# Altium schematic symbol library Ic%.SchLib: 452 symbols (part 2 of 12)
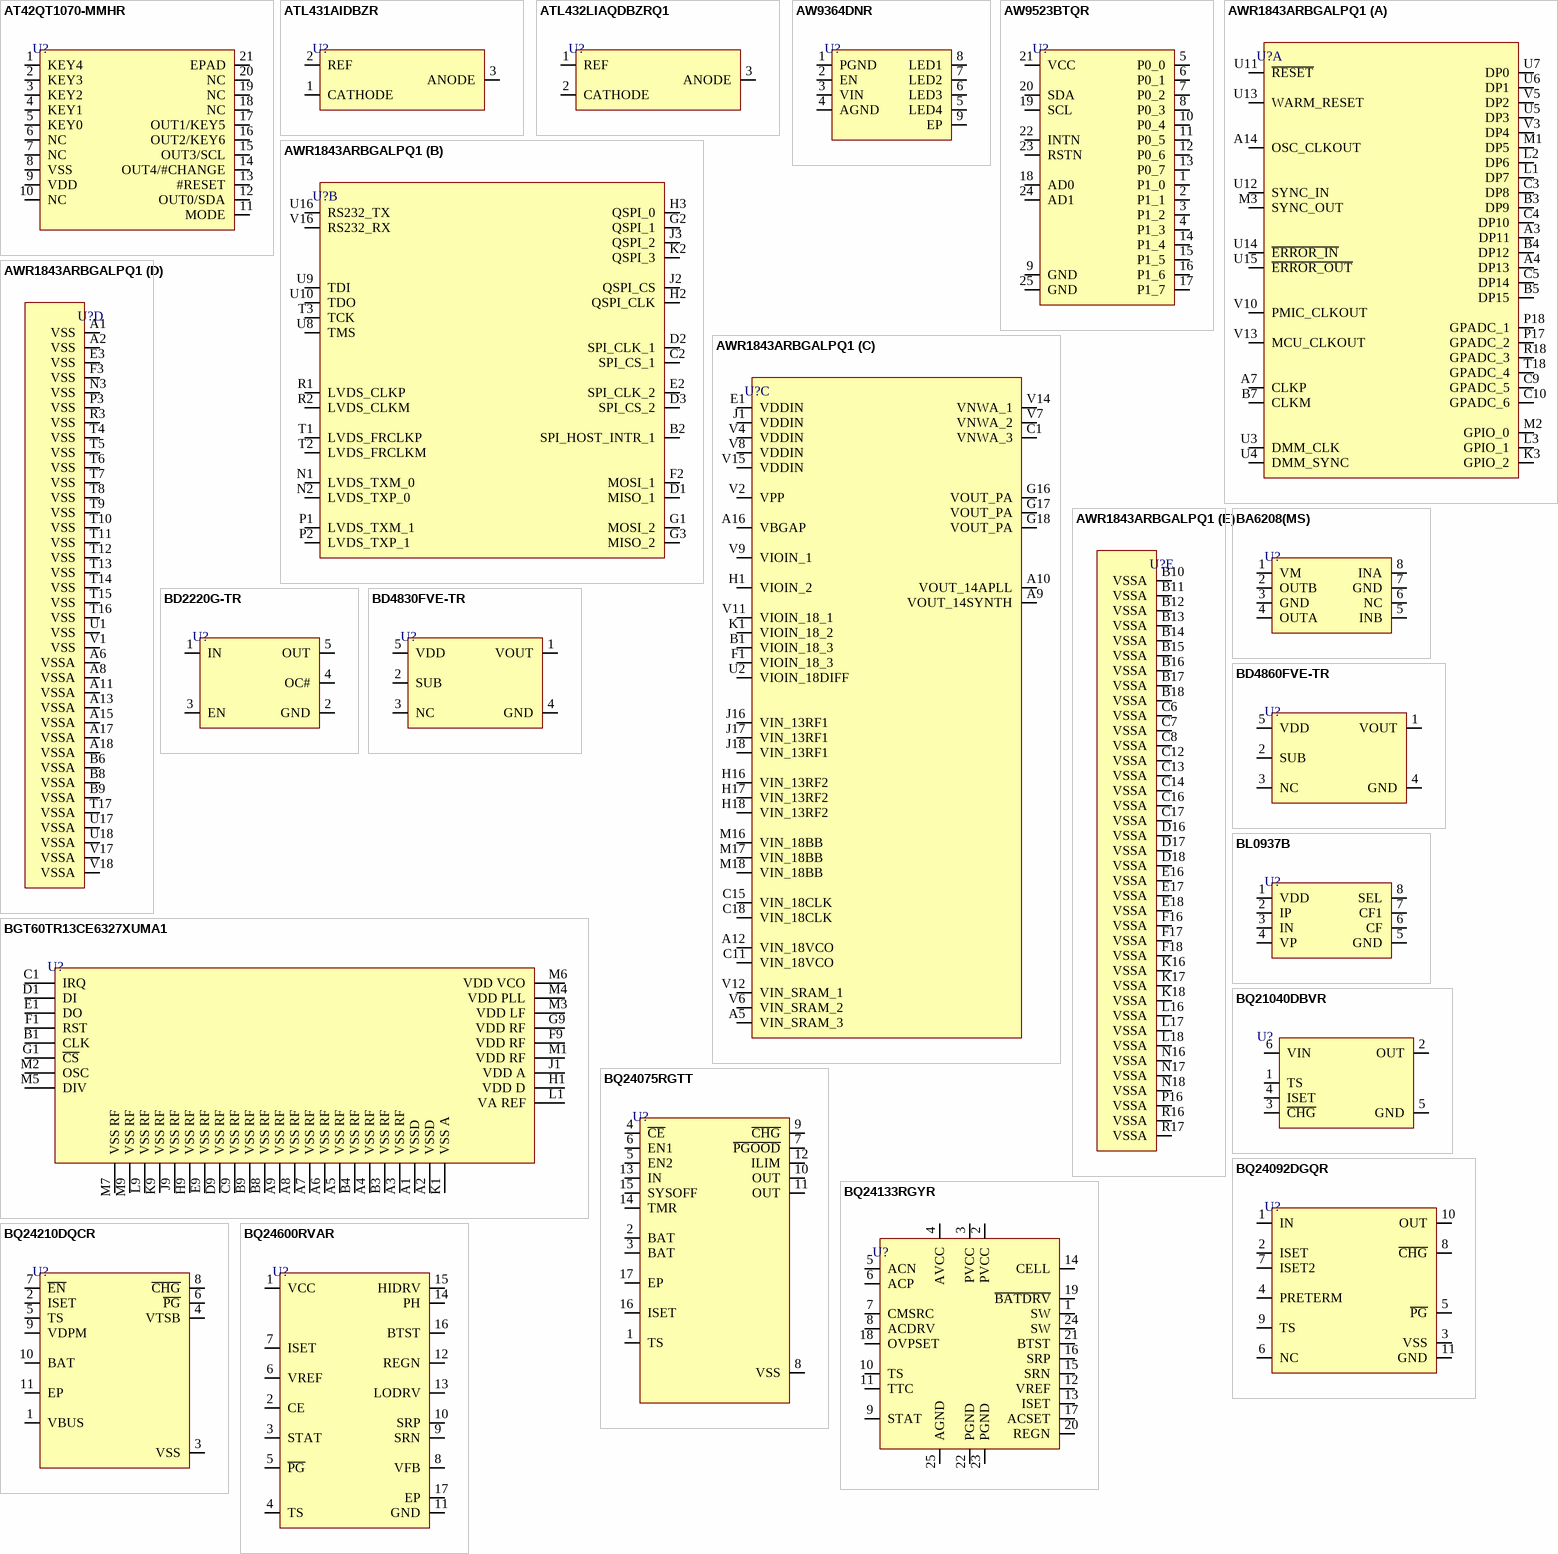
[diagram p24: symbols AT42QT1070-MMHR to BQ24600RVAR]

## BD2220G-TR
designator U?
IC PWR SWITCH N-CHAN 1:1 5SSOP; Manufacturer: Rohm; Manufacturer Part Number: BD2220G-TR; Supplier: Mouser; LCSC Part Number: C5362383; RoHS: Yes; Item Type: IC; Stock: 1594; Pricing: 1=0.86, 10=0.617, 50=0.556, 100=0.489, 1000=0.407, 10000=0.371 (USD); ComponentLink1URL: http://www.mouser.com/ds/2/348/bd2220g-e-372128.pdf?src-supplier=Mouser; ComponentLink1Description: http://www.mouser.com/ds/2/348/bd2220g-e-372128.pdf?src-supplier=Mouser; ComponentLink2URL: http://rohmfs.rohm.com/en/products/databook/datasheet/ic/power/power_switch/bd2220g-e.pdf?src-supplier=Digikey; ComponentLink2Description: http://rohmfs.rohm.com/en/products/databook/datasheet/ic/power/power_switch/bd2220g-e.pdf?src-supplier=Digikey; ComponentLink3URL: http://rohmfs.rohm.com/en/products/databook/datasheet/ic/power/power_switch/bd2220g-e.pdf?src-supplier=Avnet; ComponentLink3Description: http://rohmfs.rohm.com/en/products/databook/datasheet/ic/power/power_switch/bd2220g-e.pdf?src-supplier=Avnet
footprint SSOP-5
pins: 1 IN, 2 GND, 3 EN, 4 OC#, 5 OUT

## BD4830FVE-TR
designator U?
Active Low 1 VSOF-5 Monitors & Reset Circuits ROHS; Manufacturer: Rohm; Manufacturer Part Number: BD4830FVE-TR; Max Supply Voltage: 10V; Max Power Dissipation: 210mW; Min Supply Voltage: 1.2V; Number of Voltages Monitored: 1; Threshold Voltage: 6V; Accuracy: 1%; Operating Supply Current: 900nA; Max Supply Current: 1.98uA; Watchdog Timer: No; Min Reset Threshold Voltage: 5.91V; Max Reset Threshold Voltage: 6.09V; Item Type: IC; RoHS: Yes; Category: Voltage Supervisors; Stock 1: 5990; Pricing 1: 1=0.64000, 10=0.54900, 25=0.51200, 100=0.40960, 250=0.38032, 500=0.32182, 1000=0.24868 (USD); Mounting Technology: Surface Mount; Case/Package: VSOF; Pins: 5; Min Operating Temperature: -40°C; Max Operating Temperature: 105°C; Package Quantity: 3000; Packaging: Tape and Reel; Reset: Active Low; Number of Monitored Inputs: 1; Type: Simple Reset/Power-On Reset,Voltage Detector; Series: BD48xxx; Lead Free: Lead Free; RoHS Compliant: Yes; ComponentLink1URL: https://datasheet.ciiva.com/1974/bd48xxg-e-1974994.pdf?src-supplier=Digi-Key; ComponentLink1Description: https://datasheet.ciiva.com/1974/bd48xxg-e-1974994.pdf?src-supplier=Digi-Key; ComponentLink2URL: https://datasheet.ciiva.com/8133/bd48xxg-e-8133113.pdf?src-supplier=Avnet; ComponentLink2Description: https://datasheet.ciiva.com/8133/bd48xxg-e-8133113.pdf?src-supplier=Avnet; LCSC Part Number: C2067200; Supplier 1: Rs; Supplier Part Number 1: 1717448; ComponentLink3Description: LCSC; ComponentLink3URL: https://www.lcsc.com/product-detail/Monitors-Reset-Circuits_ROHM-Semicon-BD4830FVE-TR_C2067200.html
footprint 5-VSOF
pins: 1 VOUT, 2 SUB, 3 NC, 4 GND, 5 VDD

## BD4860FVE-TR
designator U?
IC SUPERVISOR 1 CHANNEL 5VSOF; Manufacturer: Rohm; Manufacturer Part Number: BD4860FVE-TR; Max Supply Voltage: 10V; Max Power Dissipation: 210mW; Min Supply Voltage: 1.2V; Number of Voltages Monitored: 1; Reset: Active Low; Threshold Voltage: 6V; Accuracy: 1%; Operating Supply Current: 900nA; Max Supply Current: 1.98uA; Watchdog Timer: No; Min Reset Threshold Voltage: 5.91V; Max Reset Threshold Voltage: 6.09V; Supplier 1: Digi-Key; RoHS: Yes; Category: Voltage Supervisors; Stock 1: 5990; Pricing 1: 1=0.64000, 10=0.54900, 25=0.51200, 100=0.40960, 250=0.38032, 500=0.32182, 1000=0.24868 (USD); Mounting Technology: Surface Mount; Case/Package: VSOF; Pins: 5; Min Operating Temperature: -40°C; Max Operating Temperature: 105°C; Package Quantity: 3000; Packaging: Tape and Reel; Number of Monitored Inputs: 1; Type: Simple Reset/Power-On Reset,Voltage Detector; Series: BD48xxx; Lead Free: Lead Free; RoHS Compliant: Yes; ComponentLink1URL: https://datasheet.ciiva.com/1974/bd48xxg-e-1974994.pdf?src-supplier=Digi-Key; ComponentLink1Description: https://datasheet.ciiva.com/1974/bd48xxg-e-1974994.pdf?src-supplier=Digi-Key; ComponentLink2URL: https://datasheet.ciiva.com/8133/bd48xxg-e-8133113.pdf?src-supplier=Avnet; ComponentLink2Description: https://datasheet.ciiva.com/8133/bd48xxg-e-8133113.pdf?src-supplier=Avnet; Supplier Part Number 1: BD4860FVE-CT-ND; LCSC Part Number: C509824; Item Type: IC
footprint 5-VSOF
pins: 1 VOUT, 2 SUB, 3 NC, 4 GND, 5 VDD

## BGT60TR13CE6327XUMA1
designator U?
Rf Transceiver PG-VF2BGA-40; Manufacturer: Infineon; Manufacturer Part Number: BGT60TR13CE6327XUMA1; Item Type: IC; Supplier 1: Newark; RoHS: No; Category: RF Receivers, Transceivers; Stock 1: 4397; Pricing 1: 1=20.67000, 10=18.89000, 25=17.50000, 50=16.72000, 100=15.93000, 250=15.16000, 500=14.94000, 1000=14.51000 (USD); Supplier Part Number 1: 25AK0242; LCSC Part Number: C3606641; ComponentLink1Description: LCSC; ComponentLink1URL: https://www.lcsc.com/product-detail/RF-Transceiver-ICs_Infineon-Technologies-BGT60TR13CE6327XUMA1_C3606641.html
footprint pg-vf2bga-40
pins: A1 VSSD, A2 VSSD, A3 VSS RF, A4 VSS RF, A5 VSS RF, A6 VSS RF, A7 VSS RF, A8 VSS RF, A9 VSS RF, B1 CLK, B3 VSS RF, B4 VSS RF, B8 VSS RF, B9 VSS RF, C1 IRQ, C9 VSS RF, D1 DI, D9 VSS RF, E1 DO, E9 VSS RF, F1 RST, F9 VDD RF, G1 ~{CS}, G9 VDD RF, H1 VDD D, H9 VSS RF, J1 VDD A, J9 VSS RF, K1 VSS A, K9 VSS RF, L1 VA REF, L9 VSS RF, M1 VDD RF, M2 OSC, M3 VDD LF, M4 VDD PLL, M5 DIV, M6 VDD VCO, M7 VSS RF, M9 VSS RF

## BL0937B
designator U?
SOP-8 Energy Metering ICs ROHS; Manufacturer: BL; Manufacturer Part Number: BL0937B; Item Type: IC; Package: SOP-8; LCSC Part Number: C2905202; ComponentLink1Description: LCSC; ComponentLink1URL: https://www.lcsc.com/product-detail/Energy-Metering-ICs_BL-Shanghai-Belling-BL0937B_C2905202.html
footprint SOP-8
pins: 1 VDD, 2 IP, 3 IN, 4 VP, 5 GND, 6 CF, 7 CF1, 8 SEL

## BQ21040DBVR
designator U?
IC BAT CHG LI-ION 1 CELL SOT23-6; Manufacturer: Texas Instruments; Manufacturer Part Number: BQ21040DBVR; Number of Cells: 1; Fault Protection: Over Voltage,Over Temperature,Short Circuit; Interface: USB,SPI; Output Type: Analog Current/Voltage; Max Charge Current: 800mA; Battery Pack Voltage: 4.2V; Max Supply Voltage: 6.45V; Number of Bits: 16; Number of D/A Converters: 4; Settling Time: 30us; Differential Output: No; Supplier 1: Digi-Key; Stock 1: 5958; Pricing 1: 1=1.14, 10=1.015, 100=0.7396, 500=0.61924, 1000=0.48163 (USD); Mount: Surface Mount; Case/Package: SOT-23-6; Min Operating Temperature: 0°C; Max Operating Temperature: 125°C; Packaging: Cut Tape; Lead Free: Lead Free; ComponentLink1URL: http://www.ti.com/lit/ds/symlink/bq21040.pdf?src-supplier=Digi-Key; ComponentLink1Description: http://www.ti.com/lit/ds/symlink/bq21040.pdf?src-supplier=Digi-Key; ComponentLink2URL: http://www.ti.com/general/docs/suppproductinfo.tsp?distId=10&gotoUrl=http%3A%2F%2Fwww.ti.com%2Flit%2Fgpn%2Fbq21040&src-supplier=Digi-Key; ComponentLink2Description: http://www.ti.com/general/docs/suppproductinfo.tsp?distId=10&gotoUrl=http%3A%2F%2Fwww.ti.com%2Flit%2Fgpn%2Fbq21040&src-supplier=Digi-Key; ComponentLink3URL: http://www.ti.com/general/docs/suppproductinfo.tsp?distId=10&amp;gotoUrl=http%3A%2F%2Fwww.ti.com%2Flit%2Fgpn%2Fbq21040&src-supplier=Digi-Key; ComponentLink3Description: http://www.ti.com/general/docs/suppproductinfo.tsp?distId=10&amp;gotoUrl=http%3A%2F%2Fwww.ti.com%2Flit%2Fgpn%2Fbq21040&src-supplier=Digi-Key; Supplier Part Number 1: 296-47315-1-ND; LCSC Part Number: C202311; Item Type: IC
footprint SOT-23-6
pins: 1 TS, 2 OUT, 3 ~{CH}~{G}, 4 ISET, 5 GND, 6 VIN

## BQ24075RGTT
designator U?
IC BATT CHG LI-ION 1CELL 16QFN; Manufacturer: Texas Instruments; Manufacturer Part Number: BQ24075RGTT; Supplier: Mouser; LCSC Part Number: C2865459; RoHS: Yes; Item Type: IC; Stock: 350; Pricing: 1=2.63, 10=1.96, 50=1.8, 100=1.61, 1000=1.38, 10000=1.3 (USD); ComponentLink1URL: https://datasheet.ciiva.com/15114/getdatasheetpartid-313264-15114609.pdf?src-supplier=Verical; ComponentLink1Description: https://datasheet.ciiva.com/15114/getdatasheetpartid-313264-15114609.pdf?src-supplier=Verical; ComponentLink2URL: https://datasheet.ciiva.com/1932/bq24072-1932354.pdf?src-supplier=Digikey; ComponentLink2Description: https://datasheet.ciiva.com/1932/bq24072-1932354.pdf?src-supplier=Digikey; ComponentLink3URL: https://datasheet.ciiva.com/1932/bq24072-1932355.pdf?src-supplier=Digikey; ComponentLink3Description: https://datasheet.ciiva.com/1932/bq24072-1932355.pdf?src-supplier=Digikey; ComponentLink4URL: https://datasheet.ciiva.com/1932/bq24072-1932356.pdf?src-supplier=Digikey; ComponentLink4Description: https://datasheet.ciiva.com/1932/bq24072-1932356.pdf?src-supplier=Digikey; ComponentLink5URL: https://datasheet.ciiva.com/3214/bq24079-3214045.pdf?src-supplier=Avnet; ComponentLink5Description: https://datasheet.ciiva.com/3214/bq24079-3214045.pdf?src-supplier=Avnet; ComponentLink6URL: https://datasheet.ciiva.com/1136/1857100-1136583.pdf?src-supplier=Element14; ComponentLink6Description: https://datasheet.ciiva.com/1136/1857100-1136583.pdf?src-supplier=Element14; ComponentLink7URL: https://datasheet.ciiva.com/46397/1885912-46397205.pdf?src-supplier=Element14; ComponentLink7Description: https://datasheet.ciiva.com/46397/1885912-46397205.pdf?src-supplier=Element14
footprint VQFN-16(3x3)
pins: 1 TS, 2 BAT, 3 BAT, 4 ~{CE}, 5 EN2, 6 EN1, 7 ~{PGOOD}, 8 VSS, 9 ~{CHG}, 10 OUT, 11 OUT, 12 ILIM, 13 IN, 14 TMR, 15 SYSOFF, 16 ISET, 17 EP

## BQ24092DGQR
designator U?
IC BATT CHG LI-ION 1CELL 10MSOP; Manufacturer: Texas Instruments; Manufacturer Part Number: BQ24092DGQR; Output Current: 1A; Min Supply Voltage: 3.5V; Max Supply Voltage: 6.45V; Output Voltage: 4.2V; Min Input Voltage: 4.5V; Number of Cells: 1; Interface: USB; Fault Protection: Over Voltage,Over Temperature,Short Circuit; Supplier 1: Digi-Key; RoHS: Yes; Category: Battery Management; Stock 1: 13; Pricing 1: 1=1.36000, 10=1.22000, 25=1.15760, 100=0.95080, 250=0.88880, 500=0.78546, 1000=0.65130 (USD); Case/Package: HVSSOP; Number of Pins: 10; Contact Plating: Gold; Min Operating Temperature: -40°C; Max Operating Temperature: 125°C; Packaging: Tape and Reel; Package Quantity: 2500; Max Charge Current: 1A; Battery Pack Voltage: 4.2V; Series: -; Radiation Hardening: No; Lead Free: Lead Free; RoHS Compliant: Yes; ComponentLink1URL: https://datasheet.ciiva.com/15114/getdatasheetpartid-516671-15114858.pdf?src-supplier=Verical; ComponentLink1Description: https://datasheet.ciiva.com/15114/getdatasheetpartid-516671-15114858.pdf?src-supplier=Verical; ComponentLink2URL: https://datasheet.ciiva.com/1934/bq24092-1934314.pdf?src-supplier=Digi-Key; ComponentLink2Description: https://datasheet.ciiva.com/1934/bq24092-1934314.pdf?src-supplier=Digi-Key; ComponentLink3URL: https://datasheet.ciiva.com/3214/bq24092-3214092.pdf?src-supplier=Avnet; ComponentLink3Description: https://datasheet.ciiva.com/3214/bq24092-3214092.pdf?src-supplier=Avnet; Supplier Part Number 1: 296-41204-1-ND; LCSC Part Number: C133237; Item Type: IC
footprint 10-HVSSOP (IC BATT CHG LI-ION 1CELL 10MSOP)
pins: 1 IN, 2 ISET, 3 VSS, 4 PRETERM, 5 ~{PG}, 6 NC, 7 ISET2, 8 ~{CHG}, 9 TS, 10 OUT, 11 GND

## BQ24133RGYR
designator U?
IC BATT CHG LI-ION 1-3CEL 24VQFN; Manufacturer: Texas Instruments; Manufacturer Part Number: BQ24133RGYR; Supplier: Mouser; Supplier Part Number: 595-BQ24133RGYR; RoHS: Yes; Category: Battery Management; Stock: 4511; Pricing: 1=3.03, 10=2.73, 50=2.73, 100=2.24, 1000=1.61, 10000=1.52 (USD); ComponentLink1URL: https://datasheet.ciiva.com/15115/getdatasheetpartid-543747-15115273.pdf?src-supplier=Verical; ComponentLink1Description: https://datasheet.ciiva.com/15115/getdatasheetpartid-543747-15115273.pdf?src-supplier=Verical; ComponentLink2URL: https://datasheet.ciiva.com/1934/bq24133-1934706.pdf?src-supplier=Digi-Key; ComponentLink2Description: https://datasheet.ciiva.com/1934/bq24133-1934706.pdf?src-supplier=Digi-Key; ComponentLink3URL: https://datasheet.ciiva.com/3214/bq24133-3214134.pdf?src-supplier=Avnet; ComponentLink3Description: https://datasheet.ciiva.com/3214/bq24133-3214134.pdf?src-supplier=Avnet; LCSC Part Number: C44478; Item Type: IC
footprint 24-VQFN (5.5x3.5)
pins: 1 SW, 2 PVCC, 3 PVCC, 4 AVCC, 5 ACN, 6 ACP, 7 CMSRC, 8 ACDRV, 9 STAT, 10 TS, 11 TTC, 12 VREF, 13 ISET, 14 CELL, 15 SRN, 16 SRP, 17 ACSET, 18 OVPSET, 19 ~{BAT}~{DRV}, 20 REGN, 21 BTST, 22 PGND, 23 PGND, 24 SW, 25 AGND

## BQ24210DQCR
designator U?
IC BATT CHG LI-ION 1CELL 10WSON; Manufacturer: Texas Instruments; Manufacturer Part Number: BQ24210DQCR; Supplier: Mouser; LCSC Part Number: C524795; RoHS: Yes; Item Type: IC; Stock: 11128; Pricing: 1=2.67, 10=1.99, 50=1.82, 100=1.64, 1000=1.45, 10000=1.31 (USD); ComponentLink1URL: https://datasheet.ciiva.com/4874/slusa76a-128668-4874253.pdf?src-supplier=Mouser; ComponentLink1Description: https://datasheet.ciiva.com/4874/slusa76a-128668-4874253.pdf?src-supplier=Mouser; ComponentLink2URL: https://datasheet.ciiva.com/15223/getdatasheetpartid-517676-15223141.pdf?src-supplier=Verical; ComponentLink2Description: https://datasheet.ciiva.com/15223/getdatasheetpartid-517676-15223141.pdf?src-supplier=Verical; ComponentLink3URL: https://datasheet.ciiva.com/1934/bq24210-1934532.pdf?src-supplier=Digikey; ComponentLink3Description: https://datasheet.ciiva.com/1934/bq24210-1934532.pdf?src-supplier=Digikey
footprint 10-WSON (3x2)
pins: 1 VBUS, 2 ISET, 3 VSS, 4 VTSB, 5 TS, 6 ~{PG}, 7 ~{EN}, 8 ~{CHG}, 9 VDPM, 10 BAT, 11 EP

## BQ24600RVAR
designator U?
IC BATT CHG LI-ION 1-6CEL 16VQFN; Manufacturer: Texas Instruments; Manufacturer Part Number: BQ24600RVAR; Supplier: Mouser; LCSC Part Number: C157568; RoHS: Yes; Item Type: IC; Stock: 3970; Pricing: 1=1.88, 10=1.69, 50=1.69, 100=1.36, 1000=0.928, 10000=0.8 (USD); ComponentLink1URL: https://datasheet.ciiva.com/1934/bq24600-1934848.pdf?src-supplier=Digikey; ComponentLink1Description: https://datasheet.ciiva.com/1934/bq24600-1934848.pdf?src-supplier=Digikey; ComponentLink2URL: https://datasheet.ciiva.com/15115/getdatasheetpartid-517716-15115134.pdf?src-supplier=Verical; ComponentLink2Description: https://datasheet.ciiva.com/15115/getdatasheetpartid-517716-15115134.pdf?src-supplier=Verical; ComponentLink3URL: https://datasheet.ciiva.com/3214/bq24600-3214303.pdf?src-supplier=Avnet; ComponentLink3Description: https://datasheet.ciiva.com/3214/bq24600-3214303.pdf?src-supplier=Avnet
footprint QFN-16-EP(3.6x3.6)
pins: 1 VCC "IC power positive supply. Connect, through a 10-ohm resistor to the common-source (diode-OR) point: source of high-side P-channel MOSFET and source of reverse-blocking power P-channel MOSFET. Or connect through a 10-ohm (See Datasheet)", 2 CE "Charge-enable active-HIGH logic input. HI enables charge. LO disables charge. It has an internal 1Mohm pull-down resistor.", 3 STAT "Open-drain charge status pin to indicate various charger operation (See Table 3)", 4 TS "Temperature qualification voltage input for battery pack negative temperature coefficient thermistor. Program the hot and cold temperature window with a resistor divider from VREF to TS to GND.", 5 ~{PG} "Open-drain power-good status output. The transistor turns on when a valid VCC is detected. It is turned off in the sleep mode. P\G\ can be used to drive an LED or communicate with a host processor. It can be used to drive (See Datasheet)", 6 VREF "3.3-V regulated voltage output. Place a 1-uF ceramic capacitor from VREF to the GND pin close to the IC. This voltage could be used for programming of voltage and current regulation and for programming the TS threshold.", 7 ISET "Charge current set input. The voltage of ISET pin programs the charge current regulation, pre-charge current and termination current set-point.", 8 VFB "Output voltage analog feedback adjustment. Connect the output of a resistive voltage divider from the battery terminals to this node to adjust the output battery regulation voltage.", 9 SRN "Charge-current sense resistor, negative input. A 0.1-uF ceramic capacitor is placed from SRN to SRP to provide differential-mode filtering. An optional 0.1-uF ceramic capacitor is placed from SRN pin to GND for common-mode (See Datasheet)", 10 SRP "Charge-current sense resistor, positive input. A 0.1-uF ceramic capacitor is placed from SRN to SRP to provide differential-mode filtering. A 0.1-uF ceramic capacitor is placed from SRP pin to GND for common-mode filtering.", 11 GND "Low-current sensitive analog/digital ground. On PCB layout, connect with thermal pad underneath the IC.", 12 REGN "PWM low-side driver positive 6-V supply output. Connect a 1-uF ceramic capacitor from REGN to the PGND pin, close to the IC. Use for low-side driver and high-side driver bootstrap voltage by connecting a small-signal (See Datasheet)", 13 LODRV "PWM low-side driver output. Connect to the gate of the low-side power MOSFET with a short trace.", 14 PH "PWM high-side driver negative supply. Connect to the phase-switching node (junction of the low-side power MOSFET drain, high-side power MOSFET source, and output inductor).", 15 HIDRV "PWM high-side driver output. Connect to the gate of the high-side power MOSFET with a short trace.", 16 BTST "PWM high-side driver negative supply. Connect the 0.1-uF bootstrap capacitor from PH to BTST, and a bootstrap Schottky diode from REGN to BTST.", 17 EP "Exposed pad beneath the IC. Always solder thermal pad to the board, and have vias on the thermal pad plane star-connecting to GND and ground plane for high-current power converter. It also serves as a thermal pad to (See Datasheet)"

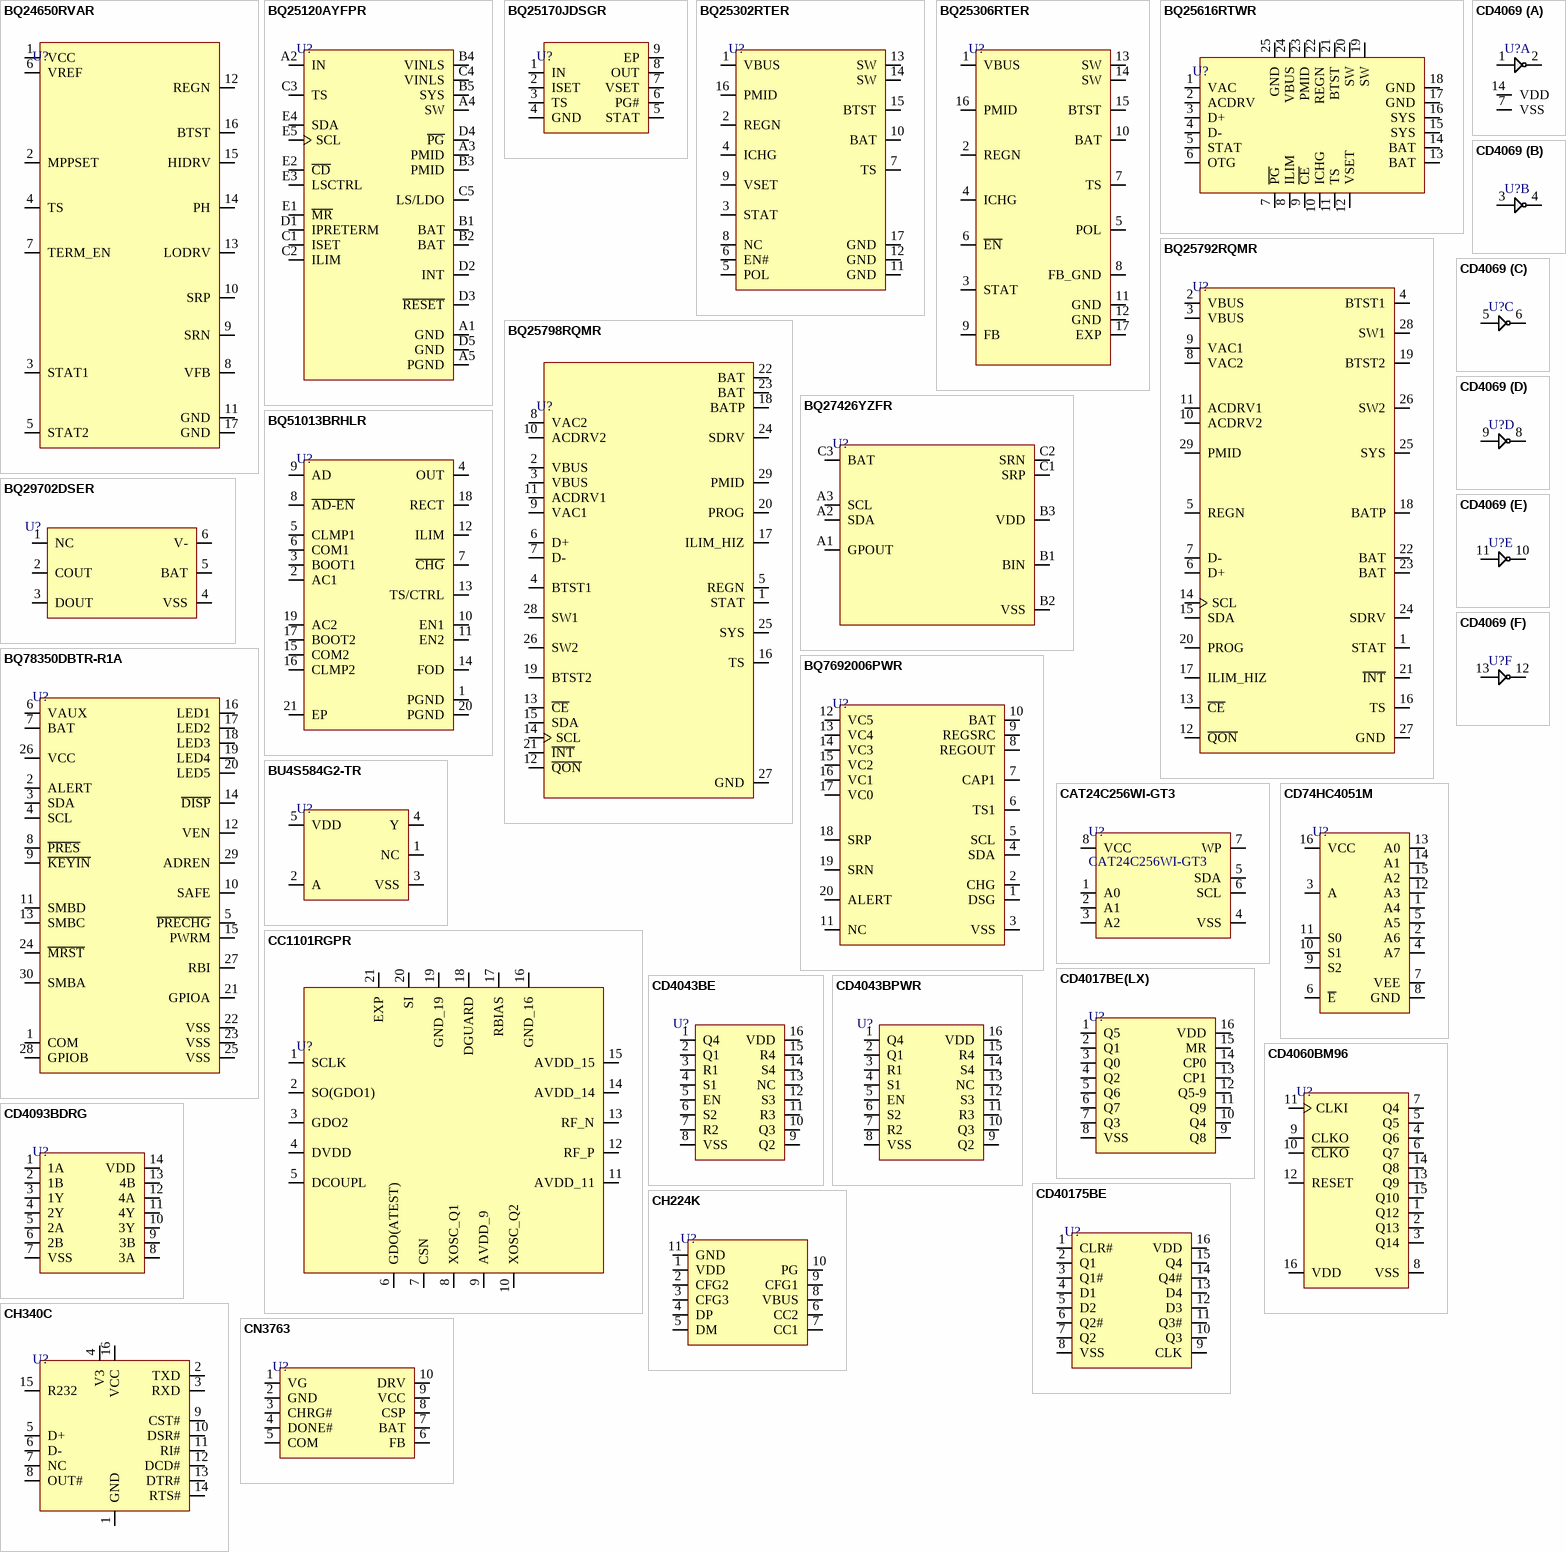
[diagram p2: symbols BQ24650RVAR to CN3763]

## BQ24650RVAR
designator U?
IC BATT CHG MULTI-CHEM 16VQFN; Manufacturer: Texas Instruments; Manufacturer Part Number: BQ24650RVAR; Supplier 1: Digi-Key; RoHS: Yes; Category: Battery Management; Stock 1: 8347; Pricing 1: 1=4.95, 10=4.442, 25=4.1996, 100=3.6396, 250=3.453, 500=3.09836, 1000=2.61307 (USD); ComponentLink1URL: https://datasheet.ciiva.com/15115/getdatasheetpartid-517726-15115144.pdf?src-supplier=Verical; ComponentLink1Description: https://datasheet.ciiva.com/15115/getdatasheetpartid-517726-15115144.pdf?src-supplier=Verical; ComponentLink2URL: https://datasheet.ciiva.com/1934/bq24650-1934895.pdf?src-supplier=Digi-Key; ComponentLink2Description: https://datasheet.ciiva.com/1934/bq24650-1934895.pdf?src-supplier=Digi-Key; ComponentLink3URL: https://datasheet.ciiva.com/3214/bq24650-3214319.pdf?src-supplier=Avnet; ComponentLink3Description: https://datasheet.ciiva.com/3214/bq24650-3214319.pdf?src-supplier=Avnet; LCSC Part Number: C53712; Item Type: IC
footprint QFN-16-EP(3.6x3.6)
pins: 1 VCC, 2 MPPSET, 3 STAT1, 4 TS, 5 STAT2, 6 VREF, 7 TERM_EN, 8 VFB, 9 SRN, 10 SRP, 11 GND, 12 REGN, 13 LODRV, 14 PH, 15 HIDRV, 16 BTST, 17 GND

## BQ25120AYFPR
designator U?
IC BATT CHG LI-ION 1CELL 25DSBGA; Manufacturer: Texas Instruments; Manufacturer Part Number: BQ25120AYFPR; Min Supply Voltage: 3.4V; Nominal Supply Current: 1mA; Number of Outputs: 1NUMBER; Supplier: Mouser; LCSC Part Number: C2866577; RoHS: Yes; Item Type: IC; Stock: 1796; Pricing: 1=3.71, 10=2.8, 50=2.58, 100=2.33, 1000=1.97, 10000=1.83 (USD); Pins: 25NUMBER; Width: 0m; Height: 500um; Thickness: 0m; ComponentLink1URL: http://www.ti.com/lit/ds/symlink/bq25120a.pdf?src-supplier=Digikey; ComponentLink1Description: http://www.ti.com/lit/ds/symlink/bq25120a.pdf?src-supplier=Digikey
footprint 25-DSBGA
pins: A1 GND, A2 IN, A3 PMID, A4 SW, A5 PGND, B1 BAT, B2 BAT, B3 PMID, B4 VINLS, B5 SYS, C1 ISET, C2 ILIM, C3 TS, C4 VINLS, C5 LS/LDO, D1 IPRETERM, D2 INT, D3 ~{RESET}, D4 ~{PG}, D5 GND, E1 ~{MR}, E2 ~{CD}, E3 LSCTRL, E4 SDA, E5 SCL

## BQ25170JDSGR
designator U?
IC BATTERY MANAGEMENT; Manufacturer: Texas Instruments; Manufacturer Part Number: BQ25170JDSGR; Supplier: Mouser; LCSC Part Number: C3682876; RoHS: No; Item Type: IC; Stock: 3618; Pricing: 1=0.8, 10=0.513, 50=0.513, 100=0.42, 1000=0.387, 10000=0.343 (USD)
footprint WSON-8(2x2)
pins: 1 IN, 2 ISET, 3 TS, 4 GND, 5 STAT, 6 PG#, 7 VSET, 8 OUT, 9 EP

## BQ25302RTER
designator U?
IC BATT CHG LI-ION 1CELL 16WQFN; Manufacturer: Texas Instruments; Manufacturer Part Number: BQ25302RTER; Item Type: Integrated Circuits (ICs); Supplier: Mouser; Supplier Part Number: 595-BQ25302RTER; RoHS: Yes; Stock: 6794; Pricing: 1=1.21, 10=1.03, 50=1.03, 100=0.824, 1000=0.709, 10000=0.661 (USD)
footprint 16-QFN (3x3).
pins: 1 VBUS, 2 REGN, 3 STAT, 4 ICHG, 5 POL, 6 EN#, 7 TS, 8 NC, 9 VSET, 10 BAT, 11 GND, 12 GND, 13 SW, 14 SW, 15 BTST, 16 PMID, 17 GND

## BQ25306RTER
designator U?
STANDALONE 17-V, 3-A SINGLE CELL; Manufacturer: Texas Instruments; Manufacturer Part Number: BQ25306RTER; Item Type: IC; Supplier: Mouser; LCSC Part Number: C3682611; RoHS: Yes; Stock: 4465; Pricing: 1=2.27, 10=1.48, 50=1.48, 100=1.21, 1000=1.11, 10000=0.937 (USD)
footprint 16-WQFN (3x3)
pins: 1 VBUS, 2 REGN, 3 STAT, 4 ICHG, 5 POL, 6 ~{EN}, 7 TS, 8 FB_GND, 9 FB, 10 BAT, 11 GND, 12 GND, 13 SW, 14 SW, 15 BTST, 16 PMID, 17 EXP

## BQ25616RTWR
designator U?
IC BATT CHG LI-ION 1CELL 24WQFN; Manufacturer: Texas Instruments; Manufacturer Part Number: BQ25616RTWR; Supplier 1: Mouser; RoHS: Yes; Category: Battery Management; Stock 1: 169; Pricing 1: 1=3.06000, 10=2.75000, 50=2.60000, 100=2.26000, 1000=1.68000, 10000=1.67000 (USD); ComponentLink1URL: http://www.ti.com/general/docs/suppproductinfo.tsp?distId=10&amp;gotoUrl=http%3A%2F%2Fwww.ti.com%2Flit%2Fgpn%2Fbq25616&src-supplier=Digi-Key; ComponentLink1Description: http://www.ti.com/general/docs/suppproductinfo.tsp?distId=10&amp;gotoUrl=http%3A%2F%2Fwww.ti.com%2Flit%2Fgpn%2Fbq25616&src-supplier=Digi-Key; Supplier Part Number 1: 595-BQ25616RTWR; LCSC Part Number: C2866447; Item Type: IC
footprint 24-WQFN (4x4)
pins: 1 VAC, 2 ACDRV, 3 D+, 4 D-, 5 STAT, 6 OTG, 7 ~{PG}, 8 ILIM, 9 ~{CE}, 10 ICHG, 11 TS, 12 VSET, 13 BAT, 14 BAT, 15 SYS, 16 SYS, 17 GND, 18 GND, 19 SW, 20 SW, 21 BTST, 22 REGN, 23 PMID, 24 VBUS, 25 GND

## BQ25792RQMR
designator U?
Charger IC Lithium Ion/Polymer 29-VQFN-HR (4x4); Manufacturer: Texas Instruments; Manufacturer Part Number: BQ25792RQMR; Supplier: Mouser; Supplier Part Number: 595-BQ25792RQMR; RoHS: Yes; Item Type: IC; Stock: 3694; Pricing: 1=6.03, 10=4.63, 50=4.28, 100=3.89, 1000=3.49, 10000=3.38 (USD)
footprint 29-VQFN-HR (4x4)
pins: 1 STAT, 2 VBUS, 3 VBUS, 4 BTST1, 5 REGN, 6 D+, 7 D-, 8 VAC2, 9 VAC1, 10 ACDRV2, 11 ACDRV1, 12 ~{QON}, 13 ~{CE}, 14 SCL, 15 SDA, 16 TS, 17 ILIM_HIZ, 18 BATP, 19 BTST2, 20 PROG, 21 ~{INT}, 22 BAT, 23 BAT, 24 SDRV, 25 SYS, 26 SW2, 27 GND, 28 SW1, 29 PMID

## BQ25798RQMR
designator U?
Charger IC Lithium Ion/Polymer 29-VQFN-HR (4x4); Manufacturer: Texas Instruments; Manufacturer Part Number: BQ25798RQMR; Supplier: Mouser; Supplier Part Number: 595-BQ25798RQMR; RoHS: No; Item Type: IC; Stock: 14280; Pricing: 1=5.02, 10=3.83, 50=3.53, 100=3.2, 1000=2.69, 10000=2.57 (USD); Pins: 29NUMBER; Length: 4mm; Width: 4mm; Height: 1mm; Thickness: 900um
footprint 29-VQFN-HR (4x4)
pins: 1 STAT, 2 VBUS, 3 VBUS, 4 BTST1, 5 REGN, 6 D+, 7 D-, 8 VAC2, 9 VAC1, 10 ACDRV2, 11 ACDRV1, 12 ~{QON}, 13 ~{CE}, 14 SCL, 15 SDA, 16 TS, 17 ILIM_HIZ, 18 BATP, 19 BTST2, 20 PROG, 21 ~{INT}, 22 BAT, 23 BAT, 24 SDRV, 25 SYS, 26 SW2, 27 GND, 28 SW1, 29 PMID

## BQ27426YZFR
designator U?
IC FUEL GAUGE LI-ION 1CL 9DSBGA; Manufacturer: Texas Instruments; Manufacturer Part Number: BQ27426YZFR; Supplier: Mouser; Supplier Part Number: 595-BQ27426YZFR; RoHS: Yes; Category: Battery Management; Stock: 3166; Pricing: 1=1.63, 10=1.47, 50=1.47, 100=1.18, 1000=0.877, 10000=0.694 (USD); ComponentLink1URL: http://www.ti.com/lit/pdf/sluubb0?src-supplier=Digikey; ComponentLink1Description: http://www.ti.com/lit/pdf/sluubb0?src-supplier=Digikey; ComponentLink2URL: http://www.ti.com/lit/gpn/bq27426?src-supplier=Mouser; ComponentLink2Description: http://www.ti.com/lit/gpn/bq27426?src-supplier=Mouser; LCSC Part Number: C165137; Item Type: IC
footprint DSBGA-9 (1.651x1.61)
pins: A1 GPOUT, A2 SDA, A3 SCL, B1 BIN, B2 VSS, B3 VDD, C1 SRP, C2 SRN, C3 BAT

## BQ29702DSER
designator U?
1.5V~8V Lithium Battery 1 WSON-6(1.5x1.5) Battery Management ROHS; Manufacturer: TI; Manufacturer Part Number: BQ29702DSER; Item Type: IC; Package: WSON-6(1.5x1.5); LCSC Part Number: C2872632
footprint WSON-6(1.5x1.5)
pins: 1 NC, 2 COUT, 3 DOUT, 4 VSS, 5 BAT, 6 V-

## BQ51013BRHLR
designator U?
Wireless Power Receiver PMIC 20-VQFN (3.5x4.5); Manufacturer: Texas Instruments; Manufacturer Part Number: BQ51013BRHLR; Item Type: IC; Output Voltage: 5V; Output Current: 1.5A; Supplier: Mouser; LCSC Part Number: C55663; RoHS: Yes; Stock: 4754; Pricing: 1=3.34, 10=3, 50=3, 100=2.46, 1000=1.76, 10000=1.67 (USD); Mounting Technology: Surface Mount; Case/Package: VQFN; Pins: 20; Contact Plating: Gold; Min Operating Temperature: 0°C; Max Operating Temperature: 125°C; Packaging: Tape and Reel; Package Quantity: 3000; Series: -; Operating Supply Current: 1.5A; Logic Function: Receiver; Lead Free: Lead Free; RoHS Compliant: Yes; ComponentLink1URL: https://datasheet.ciiva.com/6601/bq51013b-6601292.pdf?src-supplier=Digikey; ComponentLink1Description: https://datasheet.ciiva.com/6601/bq51013b-6601292.pdf?src-supplier=Digikey
footprint 20-VQFN (3.5x4.5)
pins: 1 PGND "Power ground", 2 AC1 "AC input from receiver coil antenna.", 3 BOOT1 "Bootstrap capacitors for driving the high-side FETs of the synchronous rectifier. Connect a 10 nF ceramic capacitor from BOOT1 to AC1 and from BOOT2 to AC2.", 4 OUT "Output pin, delivers power to the load", 5 CLMP1 "Open drain FETs which are utilized for a non-power dissipative over-voltage AC clamp protection. When the RECT voltage goes above 15 V, both switches will be turned on and the capacitors will act as a low impedance to (See Datasheet)", 6 COM1 "Open-drain output used to communicate with primary by varying reflected impedance. Connect through a capacitor to either AC1 or AC2 for capacitive load modulation (COM2 must be connected to the alternate AC1 or AC2 pin). For (See Datasheet)", 7 ~{CHG} "Open-drain output - active when output current is being delivered to the load (i.e. when the output of the supply is enabled).", 8 ~{AD-EN} "Push-pull driver for external PFET connecting AD and OUT. This node is pulled to the higher of OUT and AD when turning off the external FET. This voltage tracks approximately 4 V below AD when voltage is present at AD and (See Datasheet)", 9 AD "Connect this pin to the wired adapter input. When a voltage is applied to this pin wireless charging is disabled and AD_EN is driven low. Connect to GND through a 1 uF capacitor. If unused, capacitor is not required and (See Datasheet)", 10 EN1 "Inputs that allow user to enable/disable wireless and wired charging <EN1 EN2>: <00> wireless charging is enabled unless AD voltage > 3.6 V <01> Dynamic communication current limit disabled <10> A\D\-\E\N\ pulled low, (See Datasheet)", 11 EN2 "Inputs that allow user to enable/disable wireless and wired charging <EN1 EN2>: <00> wireless charging is enabled unless AD voltage > 3.6 V <01> Dynamic communication current limit disabled <10> A\D\-\E\N\ pulled low, (See Datasheet)", 12 ILIM "Programming pin for the over current limit. Connect external resistor to VSS. Size RILIM with the following equation: RILIM = 250 / IMAX where IMAX is the expected maximum output current of the wireless power supply. The (See Datasheet)", 13 TS/CTRL "Must be connected to ground via a resistor. If an NTC function is not desired connect to GND with a 10 kohm resistor. As a CTRL pin pull to ground to send end power transfer (EPT) fault to the transmitter or pull-up to an (See Datasheet)", 14 FOD "Input for the recieved power measurement. Connect to GND with a 188 ohm resistor. Please refer FOD section for more detail.", 15 COM2 "Open-drain output used to communicate with primary by varying reflected impedance. Connect through a capacitor to either AC1 or AC2 for capacitive load modulation (COM2 must be connected to the alternate AC1 or AC2 pin). For (See Datasheet)", 16 CLMP2 "Open drain FETs which are utilized for a non-power dissipative over-voltage AC clamp protection. When the RECT voltage goes above 15 V, both switches will be turned on and the capacitors will act as a low impedance to (See Datasheet)", 17 BOOT2 "Bootstrap capacitors for driving the high-side FETs of the synchronous rectifier. Connect a 10 nF ceramic capacitor from BOOT1 to AC1 and from BOOT2 to AC2.", 18 RECT "Filter capacitor for the internal synchronous rectifier. Connect a ceramic capacitor to PGND. Depending on the power levels, the value may be 4.7 uF to 22 uF.", 19 AC2 "AC input from receiver coil antenna.", 20 PGND "Power ground", 21 EP

## BQ78350DBTR-R1A
designator U?
IC BATT MON LI-ION 3-15C 30TSSOP; Manufacturer: Texas Instruments; Manufacturer Part Number: BQ78350DBTR-R1A; Supplier: Mouser; Supplier Part Number: 595-BQ78350DBTR-R1A; RoHS: Yes; Category: Battery Management; Stock: 3337; Pricing: 1=4.71, 10=4, 50=4, 100=3.47, 1000=2.49, 10000=2.36 (USD); ComponentLink1URL: http://www.ti.com/general/docs/suppproductinfo.tsp?distId=10&amp;gotoUrl=http%3A%2F%2Fwww.ti.com%2Flit%2Fgpn%2FBQ78350-R1A&src-supplier=Digi-Key; ComponentLink1Description: http://www.ti.com/general/docs/suppproductinfo.tsp?distId=10&amp;gotoUrl=http%3A%2F%2Fwww.ti.com%2Flit%2Fgpn%2FBQ78350-R1A&src-supplier=Digi-Key
footprint TSSOP-30
pins: 1 COM, 2 ALERT, 3 SDA, 4 SCL, 5 ~{PRECHG}, 6 VAUX, 7 BAT, 8 ~{PRES}, 9 ~{KEYIN}, 10 SAFE, 11 SMBD, 12 VEN, 13 SMBC, 14 ~{DISP}, 15 PWRM, 16 LED1, 17 LED2, 18 LED3, 19 LED4, 20 LED5, 21 GPIOA, 22 VSS, 23 VSS, 24 ~{MRST}, 25 VSS, 26 VCC, 27 RBI, 28 GPIOB, 29 ADREN, 30 SMBA

## BQ7692006PWR
designator U?
IC BATT MON MULTI 3-5C 20TSSOP; Manufacturer: Texas Instruments; Manufacturer Part Number: BQ7692006PWR; Supplier: Mouser; Supplier Part Number: 595-BQ7692006PWR; RoHS: Yes; Category: Battery Management; Stock: 12739; Pricing: 1=3.26, 10=2.77, 50=2.77, 100=2.41, 1000=1.73, 10000=1.53 (USD); ComponentLink1URL: https://datasheet.ciiva.com/48478/bq76920-48478374.pdf?src-supplier=Avnet; ComponentLink1Description: https://datasheet.ciiva.com/48478/bq76920-48478374.pdf?src-supplier=Avnet
footprint TSSOP-20
pins: 1 DSG, 2 CHG, 3 VSS, 4 SDA, 5 SCL, 6 TS1, 7 CAP1, 8 REGOUT, 9 REGSRC, 10 BAT, 11 NC, 12 VC5, 13 VC4, 14 VC3, 15 VC2, 16 VC1, 17 VC0, 18 SRP, 19 SRN, 20 ALERT

## BU4S584G2-TR
designator U?
IC INVERT SCHMITT 1CH 1INP 5SSOP; Manufacturer: Rohm; Manufacturer Part Number: BU4S584G2-TR; Supplier: Rs; Supplier Part Number: 1682362; RoHS: Yes; Category: Logic Gates; Stock: 145; Pricing: 25=0.466, 125=0.394, 625=0.307, 1250=0.299, 2500=0.291 (GBP); ComponentLink1URL: https://datasheet.ciiva.com/15089/getdatasheetpartid-451247-15089726.pdf?src-supplier=Verical; ComponentLink1Description: https://datasheet.ciiva.com/15089/getdatasheetpartid-451247-15089726.pdf?src-supplier=Verical; ComponentLink2URL: https://datasheet.ciiva.com/16203/bu4s584g2-e-16203782.pdf?src-supplier=Future+Electronics; ComponentLink2Description: https://datasheet.ciiva.com/16203/bu4s584g2-e-16203782.pdf?src-supplier=Future+Electronics; ComponentLink3URL: https://datasheet.ciiva.com/26326/140506-da-01-en-ic-bu4s584g2-tr-ssop5-26326013.pdf?src-supplier=Conrad; ComponentLink3Description: https://datasheet.ciiva.com/26326/140506-da-01-en-ic-bu4s584g2-tr-ssop5-26326013.pdf?src-supplier=Conrad; ComponentLink4URL: https://datasheet.ciiva.com/1863/bu4s01g2-e-1863485.pdf?src-supplier=Digikey; ComponentLink4Description: https://datasheet.ciiva.com/1863/bu4s01g2-e-1863485.pdf?src-supplier=Digikey; ComponentLink5URL: https://datasheet.ciiva.com/1863/bu4s01g2-e-1863486.pdf?src-supplier=Digikey; ComponentLink5Description: https://datasheet.ciiva.com/1863/bu4s01g2-e-1863486.pdf?src-supplier=Digikey; ComponentLink6URL: https://datasheet.ciiva.com/1863/bu4s01g2-e-1863487.pdf?src-supplier=Digikey; ComponentLink6Description: https://datasheet.ciiva.com/1863/bu4s01g2-e-1863487.pdf?src-supplier=Digikey; ComponentLink7URL: https://datasheet.ciiva.com/8247/bu4s01g2-e-8247480.pdf?src-supplier=Avnet; ComponentLink7Description: https://datasheet.ciiva.com/8247/bu4s01g2-e-8247480.pdf?src-supplier=Avnet
footprint SSOP-5
pins: 1 NC, 2 A, 3 VSS, 4 Y, 5 VDD

## CAT24C256WI-GT3
designator U?
IC EEPROM 256KBIT I2C 1MHZ 8SOIC; Manufacturer: ON Semiconductor; Interface: I2C,Serial,2-Wire; Access Time: 900ns; Max Supply Voltage: 5.5V; Min Supply Voltage: 1.8V; Frequency: 400kHz; Memory Size: 256Kb; Number of Words: 32000; Operating Supply Voltage: 5V; Nominal Supply Current: 3mA; Write Cycle Time-Max (tWC): 5ms; Write Protection: YES; Organization: 32KX8; Supplier 1: RSComponents; Manufacturer Part Number: CAT24C256WI-GT3; RoHS: Yes; Category: EEPROM; Stock 1: 300; Pricing 1: 100=0.19900, 200=0.19400, 500=0.18900, 1000=0.18400 (GBP); Mount: Surface Mount; Case/Package: SOIC; Number of Pins: 8; Contact Plating: Gold; Min Operating Temperature: -40°C; Max Operating Temperature: 85°C; Packaging: Tape and Reel; Density: 256Kb; Package Quantity: 1; Memory Type: EEPROM; Max Frequency: 400kHz; Series: -; Supply Voltage-Nom: 5.5V; Access Time-Max: 900ns; Supply Current: 3mA; Length: 5mm; Width: 4mm; Height: 1.5mm; Radiation Hardening: No; Lead Free: Lead Free; Halogen Free: Halogen Free; REACH SVHC: No SVHC; RoHS Compliant: Yes; ComponentLink1URL: https://datasheet.ciiva.com/8072/1780696-8072142.pdf?src-supplier=Element14; ComponentLink1Description: https://datasheet.ciiva.com/8072/1780696-8072142.pdf?src-supplier=Element14; ComponentLink2URL: https://datasheet.ciiva.com/46391/1792913-46391371.pdf?src-supplier=Element14; ComponentLink2Description: https://datasheet.ciiva.com/46391/1792913-46391371.pdf?src-supplier=Element14; ComponentLink3URL: https://datasheet.ciiva.com/4859/cat24c256-d-105771-4859816.pdf?src-supplier=Mouser; ComponentLink3Description: https://datasheet.ciiva.com/4859/cat24c256-d-105771-4859816.pdf?src-supplier=Mouser; ComponentLink4URL: https://datasheet.ciiva.com/16427/cat24c256-d-16427973.pdf?src-supplier=Future+Electronics; ComponentLink4Description: https://datasheet.ciiva.com/16427/cat24c256-d-16427973.pdf?src-supplier=Future+Electronics; Supplier Part Number 1: 8080199P
footprint CAT24C256WI-GT3
pins: 1 A0, 2 A1, 3 A2, 4 VSS, 5 SDA, 6 SCL, 7 WP, 8 VCC

## CC1101RGPR
designator U?
IC RF TXRX ISM<1GHZ 20VFQFN; Manufacturer: Texas Instruments; Manufacturer Part Number: CC1101RGPR; Min Supply Voltage: 1.8V; Max Supply Voltage: 3.6V; Data Rate: 600Kbps; Frequency: 928MHz; Interface: SPI; Number of Receivers: 1; Sensitivity: -116dBm; Density: 0B; Current - Receiving: 17.1mA; Current - Transmitting: 34.2mA; Output Power (dBm): 12dBm; Supplier: Mouser; Supplier Part Number: 595-CC1101RGPR; RoHS: Yes; Category: RF Receivers, Transceivers; Stock: 8617; Pricing: 1=3.07, 10=2.76, 50=2.76, 100=2.26, 250=2.14, 500=1.92, 1000=1.62, 3000=1.54, 6000=1.48, 10000=1.54 (USD); Mounting Technology: Surface Mount; Case/Package: QFN; Pins: 20; Contact Plating: Gold; Weight: 0.002469oz; Min Operating Temperature: -40°C; Max Operating Temperature: 85°C; Packaging: Tape and Reel; Package Quantity: 3000; Number of Transmitters: 1; Clock Frequency: 928MHz; Series: -; Length: 4.15mm; Depth: 4.15mm; Reach SVHC Compliant: No; Lead Free: Lead Free; RoHS Compliant: Yes; ComponentLink1URL: https://datasheet.ciiva.com/15040/cc1101-15040501.pdf?src-supplier=Digi-Key; ComponentLink1Description: https://datasheet.ciiva.com/15040/cc1101-15040501.pdf?src-supplier=Digi-Key; ComponentLink2URL: https://datasheet.ciiva.com/15040/cc1101-15040502.pdf?src-supplier=Digi-Key; ComponentLink2Description: https://datasheet.ciiva.com/15040/cc1101-15040502.pdf?src-supplier=Digi-Key; LCSC Part Number: C29953; Item Type: IC
footprint 20-QFN (4x4)
pins: 1 SCLK, 2 SO(GDO1), 3 GDO2, 4 DVDD, 5 DCOUPL, 6 GDO(ATEST), 7 CSN, 8 XOSC_Q1, 9 AVDD_9, 10 XOSC_Q2, 11 AVDD_11, 12 RF_P, 13 RF_N, 14 AVDD_14, 15 AVDD_15, 16 GND_16, 17 RBIAS, 18 DGUARD, 19 GND_19, 20 SI, 21 EXP

## CD74HC4051M
designator U?
IC MUX 8:1 130OHM 16SOIC; Manufacturer: Texas Instruments; Manufacturer Part Number: CD74HC4051M; Bandwidth: 180MHz; Propagation Delay: 60ns; Min Supply Voltage: 2V; Max Supply Voltage: 6V; Dual Supply Voltage: 3V; Number of Channels: 1; Min Dual Supply Voltage: 1V; Max Dual Supply Voltage: 5V; Number of Bits: 8NUMBER; On-State Resistance: 130R; Logic Function: Multiplexer,Demultiplexer; Supply Type: Single,Dual; High Level Output Current: 25mA; Number of Inputs: 8; Supply Current: 16uA; Polarity: 4900Direction; Drain to Source Resistance: 40R; Supplier: Mouser; LCSC Part Number: C139301; RoHS: Yes; Item Type: IC; Stock: 39065; Pricing: 1=1.23, 10=0.729, 50=0.729, 100=0.729, 1000=0.501, 10000=0.462 (USD); Mounting Technology: Surface Mount; Case/Package: SOIC; Pins: 16; Weight: 0.004998oz; Contact Plating: Gold; Min Operating Temperature: -55°C; Max Operating Temperature: 125°C; Packaging: Rail/Tube; Series: 74HC; Package Quantity: 40; Low Level Output Current: 25mA; Number of Circuits: 1; Number of Outputs: 1; Number of Switches: 1; Thickness: 1.58mm; Radiation Hardening: No; Lead Free: 5697LeadFree; RoHS Compliant: Yes; Reach SVHC Compliant: No; ComponentLink1URL: https://datasheet.ciiva.com/15127/getdatasheetpartid-83108-15127036.pdf?src-supplier=Verical; ComponentLink1Description: https://datasheet.ciiva.com/15127/getdatasheetpartid-83108-15127036.pdf?src-supplier=Verical; ComponentLink2URL: https://datasheet.ciiva.com/6636/cd74hc4051-6636827.pdf?src-supplier=Digikey; ComponentLink2Description: https://datasheet.ciiva.com/6636/cd74hc4051-6636827.pdf?src-supplier=Digikey; ComponentLink3URL: https://datasheet.ciiva.com/1171/1840262-1171371.pdf?src-supplier=Element14; ComponentLink3Description: https://datasheet.ciiva.com/1171/1840262-1171371.pdf?src-supplier=Element14
footprint SOIC-16
pins: 1 A4, 2 A6, 3 A, 4 A7, 5 A5, 6 ~{E}, 7 VEE, 8 GND, 9 S2, 10 S1, 11 S0, 12 A3, 13 A0, 14 A1, 15 A2, 16 VCC

## CD4017BE(LX)
designator U?
Rising Edge 3V~15V 1 11MHz DIP-16 Counters, Dividers ROHS; Manufacturer: lingxingic; Manufacturer Part Number: CD4017BE(LX); Item Type: IC; Package: DIP-16; LCSC Part Number: C32710674
footprint DIP-16
pins: 1 Q5, 2 Q1, 3 Q0, 4 Q2, 5 Q6, 6 Q7, 7 Q3, 8 VSS, 9 Q8, 10 Q4, 11 Q9, 12 Q5-9, 13 CP1, 14 CP0, 15 MR, 16 VDD

## CD4043BE
designator U?
CMOS Quad NO /S Latch with 3-State Outputs 16-PDIP -55 to 125; Manufacturer: Texas Instruments; Manufacturer Part Number: CD4043BE; Max Supply Voltage: 18V; Min Supply Voltage: 3V; Turn-On Delay Time: 50ns; High Level Output Current: -4.2mA; Low Level Output Current: 6.8mA; Polarity: Non-Inverting; Logic Function: Latch,NOR GATE; Independent Circuits: 4; Number of Elements: 1; Quiescent Current: 20uA; Number of Output Lines: 3; Number of Input Lines: 8; Max Supply Current: 40nA; Input Capacitance: 5pF; Power Dissipation: 500mW; Item Type: IC; Supplier: Mouser; Supplier Part Number: 595-CD4043BE; RoHS: Yes; Category: Latches and Flip Flops; Stock: 2718; Pricing: 1=0.87, 10=0.738, 50=0.738, 100=0.566, 1000=0.404, 10000=0.35 (USD); Mounting Technology: Through Hole; Case/Package: PDIP; Pins: 16; Weight: 0.03357oz; Min Operating Temperature: -55°C; Max Operating Temperature: 125°C; Packaging: Rail/Tube; Output Type: 3-STATE; Propagation Delay: 50ns; Package Quantity: 25; Output Current: 6.8mA; Number of Circuits: 4; Number of Bits: 4; Series: 4000B; Technology: CMOS; Number of Channels: 4; Length: 19.3mm; Width: 6.35mm; Height: 4.57mm; Radiation Hardening: No; RoHS Compliant: Yes; Lead Free: Lead Free; Reach SVHC Compliant: No; ComponentLink1URL: https://datasheet.ciiva.com/14134/cd4043b-eng-tds-14134656.pdf?src-supplier=Distrelec; ComponentLink1Description: https://datasheet.ciiva.com/14134/cd4043b-eng-tds-14134656.pdf?src-supplier=Distrelec; ComponentLink2URL: https://datasheet.ciiva.com/27050/894251-27050681.pdf?src-supplier=Jameco; ComponentLink2Description: https://datasheet.ciiva.com/27050/894251-27050681.pdf?src-supplier=Jameco; ComponentLink3URL: https://datasheet.ciiva.com/15088/getdatasheetpartid-247667-15088317.pdf?src-supplier=Verical; ComponentLink3Description: https://datasheet.ciiva.com/15088/getdatasheetpartid-247667-15088317.pdf?src-supplier=Verical; ComponentLink4URL: https://datasheet.ciiva.com/1508/1830979-1508286.pdf?src-supplier=Element14; ComponentLink4Description: https://datasheet.ciiva.com/1508/1830979-1508286.pdf?src-supplier=Element14; ComponentLink5URL: https://datasheet.ciiva.com/1881/cd4043b-1881681.pdf?src-supplier=Digi-Key; ComponentLink5Description: https://datasheet.ciiva.com/1881/cd4043b-1881681.pdf?src-supplier=Digi-Key; LCSC Part Number: C39537; ComponentLink6Description: LCSC; ComponentLink6URL: https://www.lcsc.com/product-detail/Latches_Texas-Instruments-CD4043BE_C39537.html
footprint DIP-16
pins: 1 Q4, 2 Q1, 3 R1, 4 S1, 5 EN, 6 S2, 7 R2, 8 VSS, 9 Q2, 10 Q3, 11 R3, 12 S3, 13 NC, 14 S4, 15 R4, 16 VDD

## CD4043BPWR
designator U?
16-Bit Transparent D-Type Latch With 3-State Outputs 48-TVSOP -40 to 125; Manufacturer: Texas Instruments; Manufacturer Part Number: SN74LVC16373ADGVR; Item Type: IC; Supplier: Digi-Key; Supplier Part Number: 296-13242-1-ND; RoHS: Yes; Category: Latches and Flip Flops; Stock: 4536; Pricing: 1=1.51, 10=1.353, 25=1.284, 100=1.0546, 250=0.98588, 500=0.87122, 1000=0.68781 (USD); ComponentLink1URL: https://datasheet.ciiva.com/14288/sn74lvc16373a-14288272.pdf?src-supplier=Avnet; ComponentLink1Description: https://datasheet.ciiva.com/14288/sn74lvc16373a-14288272.pdf?src-supplier=Avnet; ComponentLink2URL: https://datasheet.ciiva.com/22746/1840227-22746081.pdf?src-supplier=Element14; ComponentLink2Description: https://datasheet.ciiva.com/22746/1840227-22746081.pdf?src-supplier=Element14; ComponentLink3URL: https://datasheet.ciiva.com/15088/getdatasheetpartid-527425-15088839.pdf?src-supplier=Verical; ComponentLink3Description: https://datasheet.ciiva.com/15088/getdatasheetpartid-527425-15088839.pdf?src-supplier=Verical; ComponentLink4URL: https://datasheet.ciiva.com/1882/sn74lvc16373a-1882418.pdf?src-supplier=Digi-Key; ComponentLink4Description: https://datasheet.ciiva.com/1882/sn74lvc16373a-1882418.pdf?src-supplier=Digi-Key; ComponentLink5URL: https://datasheet.ciiva.com/1882/sn74lvc16373a-1882419.pdf?src-supplier=Digi-Key; ComponentLink5Description: https://datasheet.ciiva.com/1882/sn74lvc16373a-1882419.pdf?src-supplier=Digi-Key; ComponentLink6URL: https://datasheet.ciiva.com/1882/sn74lvc16373a-1882420.pdf?src-supplier=Digi-Key; ComponentLink6Description: https://datasheet.ciiva.com/1882/sn74lvc16373a-1882420.pdf?src-supplier=Digi-Key; ComponentLink7URL: https://datasheet.ciiva.com/1508/1840227-1508576.pdf?src-supplier=Element14; ComponentLink7Description: https://datasheet.ciiva.com/1508/1840227-1508576.pdf?src-supplier=Element14; ComponentLink8URL: https://datasheet.ciiva.com/48704/001075154-da-01-en-ic-trans-sn74lvc16373adgvr-tvsop-48-tid-48704295.pdf?src-supplier=Conrad; ComponentLink8Description: https://datasheet.ciiva.com/48704/001075154-da-01-en-ic-trans-sn74lvc16373adgvr-tvsop-48-tid-48704295.pdf?src-supplier=Conrad; LCSC Part Number: C2652970; ComponentLink9Description: LCSC; ComponentLink9URL: https://www.lcsc.com/product-detail/Latches_Texas-Instruments-CD4043BPWR_C2652970.html
footprint TSSOP_16
pins: 1 Q4, 2 Q1, 3 R1, 4 S1, 5 EN, 6 S2, 7 R2, 8 VSS, 9 Q2, 10 Q3, 11 R3, 12 S3, 13 NC, 14 S4, 15 R4, 16 VDD

## CD4060BM96
designator U?
IC BINARY COUNTER 14-BIT 16SOIC; Manufacturer: Texas Instruments; Manufacturer Part Number: CD4060BM96; Supplier: Digikey; LCSC Part Number: C32699; RoHS: Yes; Item Type: IC; Stock: 25840; Pricing: 1=0.42, 10=0.296, 25=0.264, 100=0.2285, 250=0.2116, 500=0.20144, 1000=0.19306 (USD); ComponentLink1URL: https://datasheet.ciiva.com/26940/getdatasheetpartid-134495-26940293.pdf?src-supplier=Verical; ComponentLink1Description: https://datasheet.ciiva.com/26940/getdatasheetpartid-134495-26940293.pdf?src-supplier=Verical; ComponentLink2URL: https://datasheet.ciiva.com/6623/cd4060b-6623678.pdf?src-supplier=Digikey; ComponentLink2Description: https://datasheet.ciiva.com/6623/cd4060b-6623678.pdf?src-supplier=Digikey; ComponentLink3URL: https://datasheet.ciiva.com/14295/cd4060b-14295847.pdf?src-supplier=Avnet; ComponentLink3Description: https://datasheet.ciiva.com/14295/cd4060b-14295847.pdf?src-supplier=Avnet; ComponentLink4URL: https://datasheet.ciiva.com/41455/001015500-da-01-en-ic-binary-counter-cd4060bm96-soic-16-tid-41455418.pdf?src-supplier=Conrad; ComponentLink4Description: https://datasheet.ciiva.com/41455/001015500-da-01-en-ic-binary-counter-cd4060bm96-soic-16-tid-41455418.pdf?src-supplier=Conrad
footprint 16-SOIC (0.154", 3.90mm Width)
pins: 1 Q12, 2 Q13, 3 Q14, 4 Q6, 5 Q5, 6 Q7, 7 Q4, 8 VSS, 9 CLKO, 10 ~{CLKO}, 11 CLKI, 12 RESET, 13 Q9, 14 Q8, 15 Q10, 16 VDD

## CD4069
designator U?
6 1uA 3V~15V SOP-14 Inverters ROHS; Manufacturer: Slkor(SLKORMICRO Elec.); Manufacturer Part Number: CD4069; Package: SOP-14; LCSC Part Number: C3041279; Item Type: Inverter; ComponentLink1Description: LCSC; ComponentLink1URL: https://www.lcsc.com/product-detail/Inverters_Slkor-SLKORMICRO-Elec-CD4069_C3041279.html?s_z=n_cd4069
footprint SOP-14
part A pins: 1 A1, 2 Y1, 7 VSS, 14 VDD
part B pins: 3 A2, 4 Y2
part C pins: 5 A3, 6 Y3
part D pins: 8 Y4, 9 A4
part E pins: 10 Y5, 11 A5
part F pins: 12 Y6, 13 A6

## CD4093BDRG
designator U?
SOP-14 Logic Gates ROHS; Manufacturer: HANSCHIP; Manufacturer Part Number: CD4093BDRG; Item Type: IC; Package: SOP-14; LCSC Part Number: C19723780; ComponentLink1Description: LCSC; ComponentLink1URL: https://www.lcsc.com/product-detail/Logic-Gates_HANSCHIP-semiconductor-CD4093BDRG_C19723780.html
footprint SOP-14
pins: 1 1A, 2 1B, 3 1Y, 4 2Y, 5 2A, 6 2B, 7 VSS, 8 3A, 9 3B, 10 3Y, 11 4Y, 12 4A, 13 4B, 14 VDD

## CD40175BE
designator U?
IC FF D-TYPE SINGLE 4BIT 16PDIP; Manufacturer: Texas Instruments; Manufacturer Part Number: CD40175BE; Number of Outputs: 8NUMBER; Number of Channels: 4NUMBER; Supplier: Digikey; LCSC Part Number: C105634; RoHS: Yes; Item Type: IC; Stock: 2056; Pricing: 1=0.82, 10=0.588, 25=0.5288, 100=0.4641, 250=0.43328, 500=0.41468, 1000=0.39937, 2500=0.3832, 5000=0.37346 (USD); Thickness: 3.9mm; Lead Free: 5697LeadFree; ComponentLink1URL: https://datasheet.ciiva.com/14134/cd40175b-eng-tds-14134522.pdf?src-supplier=Distrelec; ComponentLink1Description: https://datasheet.ciiva.com/14134/cd40175b-eng-tds-14134522.pdf?src-supplier=Distrelec; ComponentLink2URL: https://datasheet.ciiva.com/15091/getdatasheetpartid-247664-15091683.pdf?src-supplier=Verical; ComponentLink2Description: https://datasheet.ciiva.com/15091/getdatasheetpartid-247664-15091683.pdf?src-supplier=Verical; ComponentLink3URL: https://datasheet.ciiva.com/29297/174190-da-01-en-cd40175-bms-29297466.pdf?src-supplier=Conrad; ComponentLink3Description: https://datasheet.ciiva.com/29297/174190-da-01-en-cd40175-bms-29297466.pdf?src-supplier=Conrad; ComponentLink4URL: https://datasheet.ciiva.com/14292/schs105c-14292648.pdf?src-supplier=Avnet; ComponentLink4Description: https://datasheet.ciiva.com/14292/schs105c-14292648.pdf?src-supplier=Avnet; ComponentLink5URL: https://datasheet.ciiva.com/1859/cd40175b-1859316.pdf?src-supplier=Digikey; ComponentLink5Description: https://datasheet.ciiva.com/1859/cd40175b-1859316.pdf?src-supplier=Digikey; ComponentLink6URL: https://datasheet.ciiva.com/8055/1536004-8055563.pdf?src-supplier=Element14; ComponentLink6Description: https://datasheet.ciiva.com/8055/1536004-8055563.pdf?src-supplier=Element14; ComponentLink7URL: https://datasheet.ciiva.com/1507/1834893-1507430.pdf?src-supplier=Element14; ComponentLink7Description: https://datasheet.ciiva.com/1507/1834893-1507430.pdf?src-supplier=Element14
footprint PDIP-16
pins: 1 CLR#, 2 Q1, 3 Q1#, 4 D1, 5 D2, 6 Q2#, 7 Q2, 8 VSS, 9 CLK, 10 Q3, 11 Q3#, 12 D3, 13 D4, 14 Q4#, 15 Q4, 16 VDD

## CH224K
designator U?
ESSOP-10-150mil-1mm USB PD ROHS; Manufacturer: WCH; Manufacturer Part Number: CH224K; Item Type: IC; Package: ESSOP-10-150mil-1mm; LCSC Part Number: C970725; ComponentLink1Description: LCSC; ComponentLink1URL: https://www.lcsc.com/product-detail/USB-PD_WCH-Jiangsu-Qin-Heng-CH224K_C970725.html
footprint ESSOP-10-150mil-1mm
pins: 1 VDD, 2 CFG2, 3 CFG3, 4 DP, 5 DM, 6 CC2, 7 CC1, 8 VBUS, 9 CFG1, 10 PG, 11 GND

## CH340C
designator U?
2Mbps Transceiver USB 2.0 SOP-16 USB ICs ROHS; Manufacturer: WCH; Manufacturer Part Number: CH340C; Item Type: IC; Package: SOP-16; LCSC Part Number: C84681; ComponentLink1Description: LCSC; ComponentLink1URL: https://www.lcsc.com/product-detail/USB-ICs_WCH-Jiangsu-Qin-Heng-CH340C_C84681.html
footprint SOP-16
pins: 1 GND, 2 TXD, 3 RXD, 4 V3, 5 D+, 6 D-, 7 NC, 8 OUT#, 9 CST#, 10 DSR#, 11 RI#, 12 DCD#, 13 DTR#, 14 RTS#, 15 R232, 16 VCC

## CN3763
designator U?
SSOP-10-150mil Battery Management ICs ROHS; Manufacturer: ShangHai Consonance Elec; Manufacturer Part Number: CN3763; Item Type: IC; Package: SSOP-10-150mil; LCSC Part Number: C84108; ComponentLink1Description: LCSC; ComponentLink1URL: https://www.lcsc.com/product-detail/Battery-Management-ICs_ShangHai-Consonance-Elec-CN3763_C84108.html
footprint SSOP-10-150mil
pins: 1 VG, 2 GND, 3 CHRG#, 4 DONE#, 5 COM, 6 FB, 7 BAT, 8 CSP, 9 VCC, 10 DRV

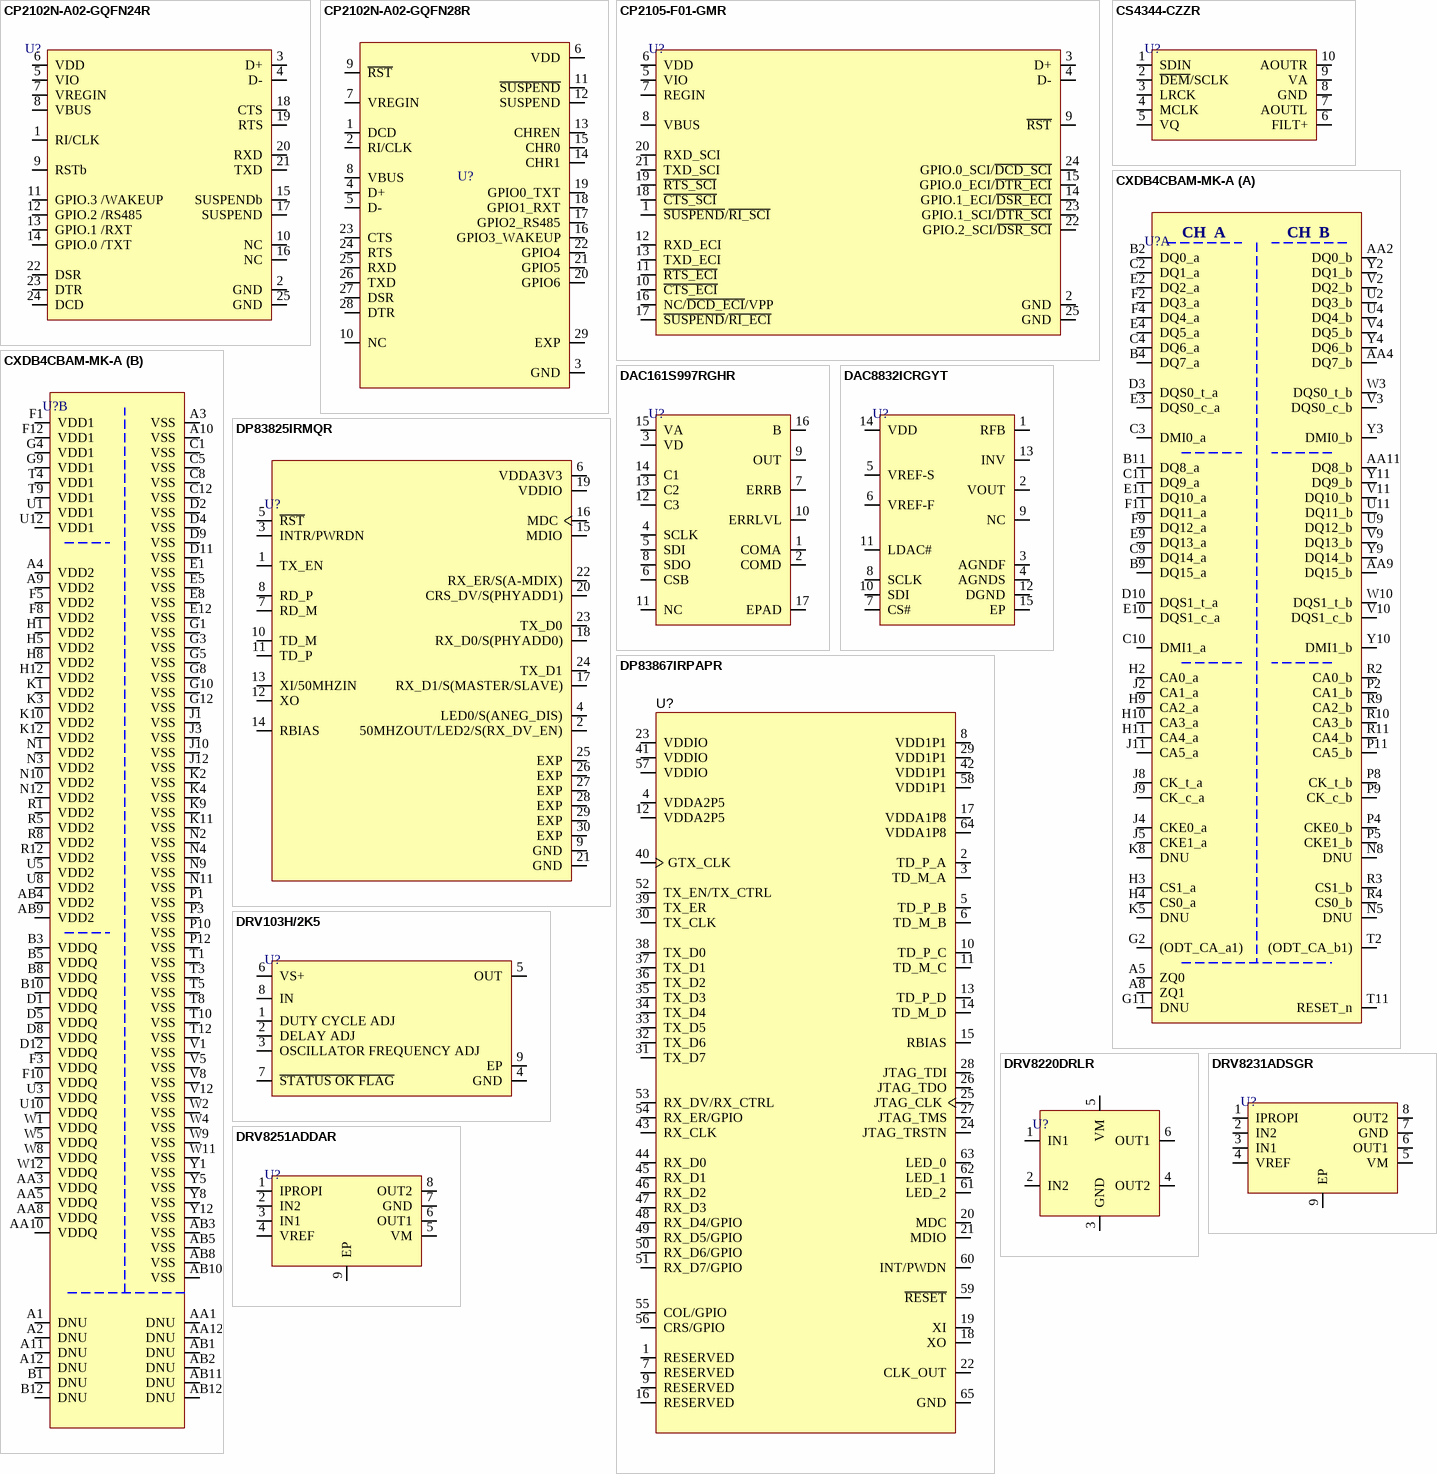
[diagram p3: symbols CP2102N-A02-GQFN24R to DRV8251ADDAR]

## CP2102N-A02-GQFN24R
designator U?
IC USB TO UART BRIDGE QFN24; Manufacturer: Silicon Labs; Manufacturer Part Number: CP2102N-A02-GQFN24R; Supplier 1: Digi-Key; RoHS: Yes; Item Type: IC; Pricing 1: 1=1.56000 (USD); Supplier Part Number 1: 336-5888-1-ND; LCSC Part Number: C969151
footprint 24-WQFN (4x4)
pins: 1 RI/CLK, 2 GND, 3 D+, 4 D-, 5 VIO, 6 VDD, 7 VREGIN, 8 VBUS, 9 RSTb, 10 NC, 11 GPIO.3 /WAKEUP, 12 GPIO.2 /RS485, 13 GPIO.1 /RXT, 14 GPIO.0 /TXT, 15 SUSPENDb, 16 NC, 17 SUSPEND, 18 CTS, 19 RTS, 20 RXD, 21 TXD, 22 DSR, 23 DTR, 24 DCD, 25 GND